# Altium footprint library Grant_..PcbLib: 97 footprints (part 2 of 7)
Each footprint in its own frame and in the unit in brackets; x right, y up, seen from the top. Pads: shape width x height; smd on the part's side, far side on the other; paste and mask are expansions set on the pad; w line width, h text height; cw(c..) or ccw(c..) is an arc to the next point about the centre after c.
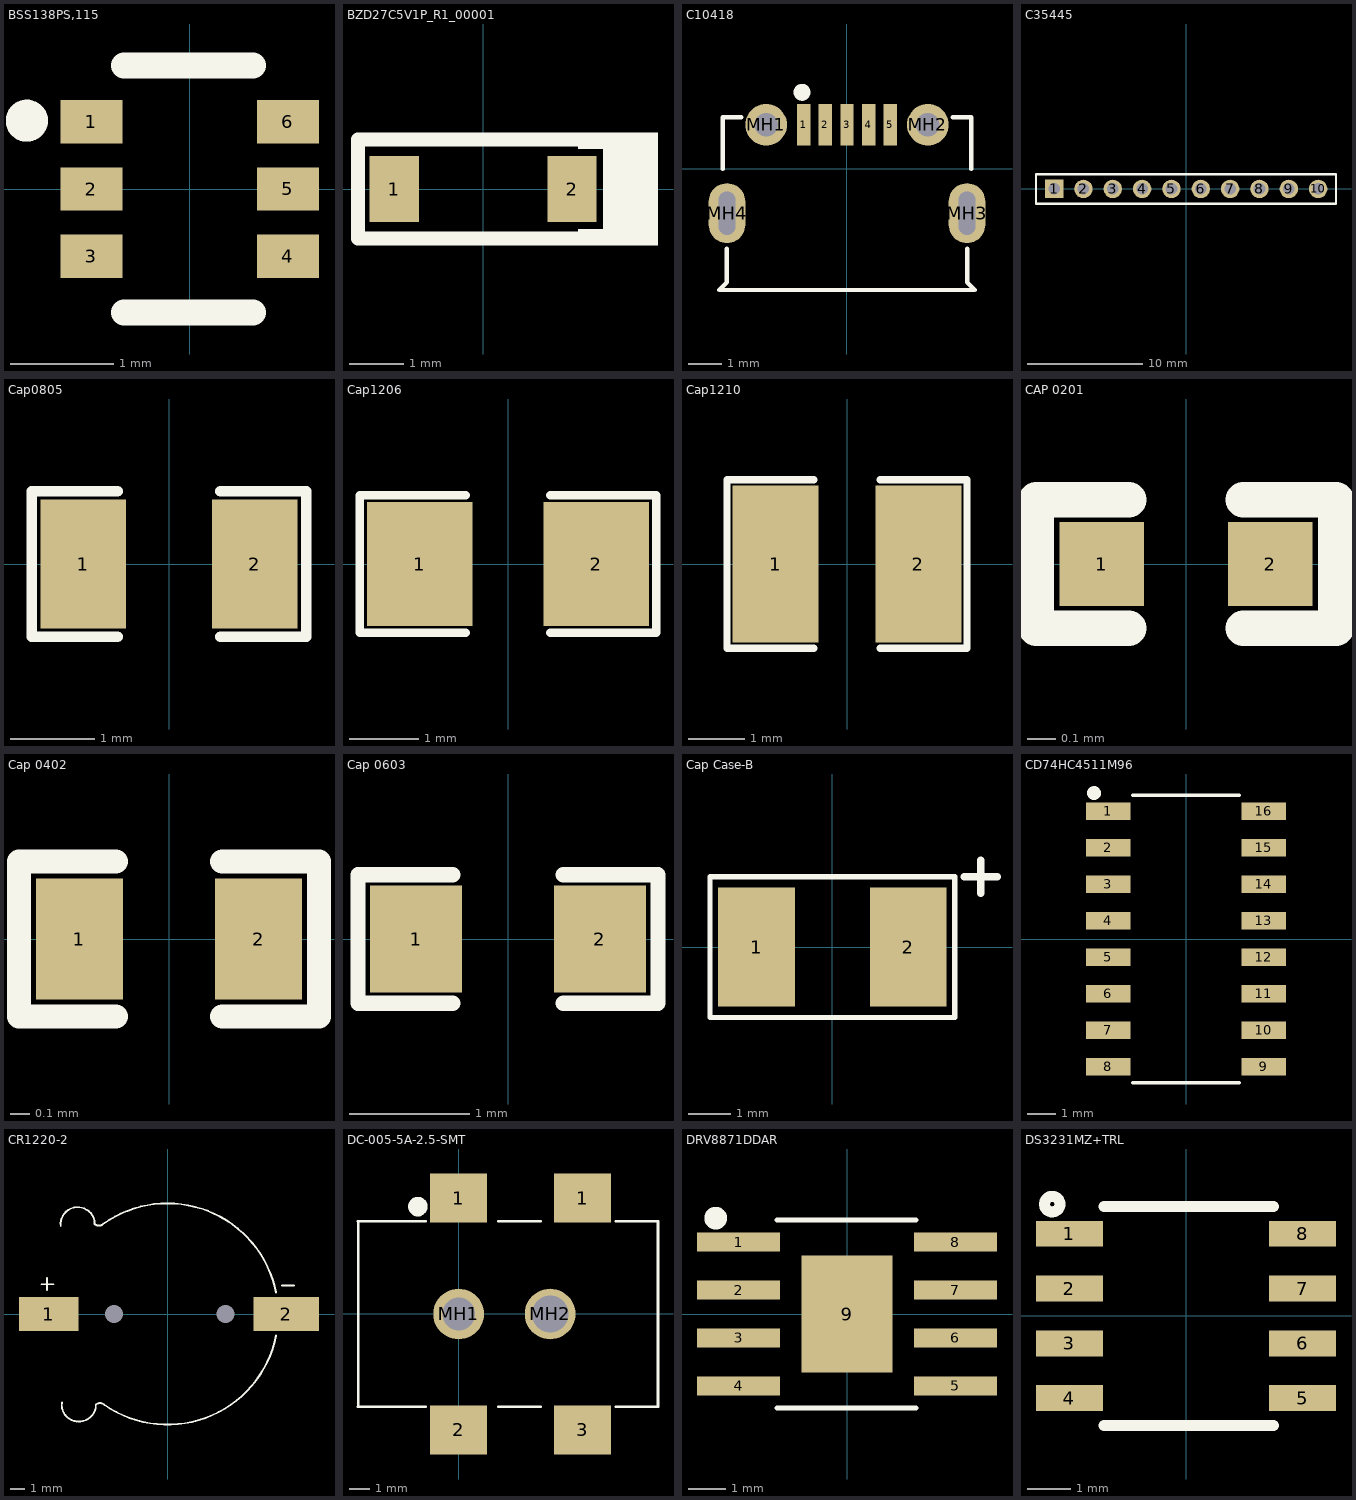
[diagram p1: the footprints below, top view; thin cyan lines are the x and y axes]

## BSS138PS,115 [mm]
pads (6):
  rect 0.6x0.42 smd: 1(-0.95,0.65) 2(-0.95,0) 3(-0.95,-0.65) 4(0.95,-0.65) 5(0.95,0) 6(0.95,0.65)
Top Overlay:
  circle w0.254: c-1.575,0.66 r0.076
  lines w0.254: -0.635,-1.194 0.61,-1.194 ; -0.635,1.194 0.61,1.194
3D body "User Library-SOT363-2.step": height 1.09, standoff -0.01, extent -1.2,-1.1 1.2,1.1

## BZD27C5V1P_R1_00001 [mm]
pads (2):
  rect 0.91x1.22 smd: 1(-1.64,0) 2(1.64,0)
Top Overlay:
  region: 3.226,1.041 2.21,1.041 2.21,-1.041 3.226,-1.041
  region: 2.286,1.041 1.753,1.041 1.753,0.737 2.286,0.737
  region: 2.286,-0.737 1.753,-0.737 1.753,-1.041 2.286,-1.041
  lines w0.254: 2.032,0.914 -2.311,0.914 -2.311,-0.914 -1.448,-0.914 2.057,-0.914
3D body "User Library-SOD-123FL.step": height 0.95, standoff 0.01, extent -1.794,-0.825 1.793,0.825

## C10418 [mm] "USB - Micro B Female USB 2 5 SMD USB Connectors RoHS"
pads (9):
  rect 0.4x1.25 smd: 1(-1.3,1.325) 2(-0.65,1.325) 3(0,1.325) 4(0.65,1.325) 5(1.3,1.325)
  round 1.25 hole 0.7: MH1(-2.425,1.325) MH2(2.425,1.325)
  oval 1.1x1.8 hole 0.5 slot 1.3 at 90 deg: MH3(3.6,-1.325) MH4(-3.6,-1.325)
Top Overlay:
  circle w0.254: c-1.35,2.3 r0.127
  lines w0.127: -3.725,0 -3.725,1.55 -3.175,1.55 ; -3.605,-2.39 -3.605,-3.39 -3.605,-3.4 -3.834,-3.629 3.825,-3.629 ; 3.605,-3.4 3.834,-3.629 ; 3.605,-3.39 3.605,-2.39 ; 3.725,0 3.725,1.55 ; 3.725,1.55 3.175,1.55 3.725,1.55
3D body "10118194c.stp": height 2.72, standoff -0.55, extent -4.025,-4.08 4.025,1.5

## C35445 [mm]
pads (10):
  rect 1.6x1.6 hole 1: 1(-11.43,0)
  round 1.6 hole 1: 2(-8.89,0) 3(-6.35,0) 4(-3.81,0) 5(-1.27,0) 6(1.27,0) 7(3.81,0) 8(6.35,0) 9(8.89,0) 10(11.43,0)
Top Overlay:
  lines w0.2: 12.975,-1.275 -13,-1.27 -13,1.27 -10.795,1.27 12.975,1.27 12.975,-1.27
3D body ".step": height 8.6, standoff -2.9, extent -12.95,-1.27 12.95,1.27

## Cap0805 [mil] "SMD 0805"
pads (2):
  rect 40x60 smd mask+2.76: 1(-40,0) 2(40,0)
Top Overlay:
  lines w5: -24,-34 -64,-34 -64,34 -24,34 ; 24,-34 64,-34 64,34 24,34
3D body "User Library-0805 SMD Capacitor.step": height 30, standoff -0.79, extent -39.36,-24.6 39.38,24.61

## Cap1206 [mil] "SMD 1206"
pads (2):
  rect 60x70 smd: 1(-50,0) 2(50,0)
Top Overlay:
  lines w5: -24,-39 -84,-39 -84,39 -24,39 ; 24,-39 84,-39 84,39 24,39
3D body "User Library-1206 SMD Capacitor.step": height 39.45, standoff 0, extent -62.96,-31.46 63.03,31.53

## Cap1210 [mil] "SMD 1210"
pads (2):
  rect 60x110 smd: 1(-50,0) 2(50,0)
Top Overlay:
  lines w5: -23,-59 -84,-59 -84,59 -23,59 ; 23,-59 84,-59 84,59 23,59
3D body "User Library-CAPC3225X10.step": height 39.37, standoff 0, extent -62.99,-49.21 63,49.22

## CAP 0201 [mm]
pads (2):
  rect 0.3x0.3 smd mask+0.055: 1(-0.3,0) 2(0.3,0)
Top Overlay:
  lines w0.127: -0.203,-0.229 -0.533,-0.229 -0.533,0.229 -0.203,0.229 ; 0.203,-0.229 0.533,-0.229 0.533,0.229 0.203,0.229
3D body "User Library-SMD Ceramic Capacitors_0201 (0603)_AB.STEP": height 0.28, standoff -0.02, extent -0.3,-0.15 0.301,0.15

## Cap 0402 [mil]
pads (2):
  rect 18x25 smd mask+2.36: 1(-18.5,0) 2(18.5,0)
Top Overlay:
  lines w5: -11,-16 -31,-16 -31,16 -11,16 ; 11,-16 31,-16 31,16 11,16
3D body "User Library-Capacitor 0402.step": height 18.5, standoff -1.18, extent -19.68,-9.84 19.7,9.85

## Cap 0603 [mil]
pads (2):
  rect 30x35 smd mask+2.36: 1(-30,0) 2(30,0)
Top Overlay:
  lines w5: -18,-21 -49,-21 -49,21 -18,21 ; 18,-21 49,-21 49,21 18,21
3D body "User Library-CAPC1608X09.step": height 34.25, standoff -1.18, extent -31.51,-15.75 31.49,15.74

## Cap Case-B [mil] "Case-B"
pads (2):
  rect 70.87x110 smd: 1(-70,0) 2(70,0)
Top Overlay:
  lines w5: -113,-65 -113,65 113,65 113,-65 -113,-65
  lines w7: 122,65 152,65 ; 137,50 137,80
3D body "User Library-AVX_BCASE.step": height 76.93, standoff -2.99, extent -72.84,-57.68 72.83,57.68

## CD74HC4511M96 [mm]
pads (16):
  rect 1.55x0.6 smd: 1(-2.7,4.445) 2(-2.7,3.175) 3(-2.7,1.905) 4(-2.7,0.635) 5(-2.7,-0.635) 6(-2.7,-1.905) 7(-2.7,-3.175) 8(-2.7,-4.445) 9(2.7,-4.445) 10(2.7,-3.175) 11(2.7,-1.905) 12(2.7,-0.635) 13(2.7,0.635) 14(2.7,1.905) 15(2.7,3.175) 16(2.7,4.445)
Top Overlay:
  circle w0.254: c-3.2,5.08 r0.114
  lines w0.127: -1.854,-5.004 1.854,-5.004 ; -1.854,5.004 1.854,5.004
3D body "CD74HC4511M96.STEP": height 1.75, standoff 0, extent -2.997,-4.953 2.997,4.953

## CR1220-2 [mm]
pads (4):
  rect 4x2.3 smd: 1(-8,0)
  rect 4.4x2.3 smd: 2(8,0)
  round 0 hole 1.22 unplated: MH1(-3.6,0) MH2(3.9,0)
Top Overlay:
  lines w0.127: -8.502,2.007 -7.689,2.007 ; -8.121,1.6 -8.121,2.413 ; -7.188,5.918 cw(c-6.058,6.058) -6.198,7.188 ; -7.113,-5.971 ccw(c-5.983,-6.111) -6.123,-7.241 ; -6.299,7.163 cw(c-6.045,6.028) -4.91,6.282 -4.91,6.068 ccw(c-4.618,6.36) -4.326,6.068 ; -6.224,-7.215 ccw(c-5.97,-6.081) -4.835,-6.335 -4.835,-6.121 cw(c-4.543,-6.413) -4.251,-6.121 ; -4.325,6.066 cw(c0,0) 7.306,1.456 ; -4.25,-6.119 ccw(c0,0) 7.306,-1.456 ; 7.703,1.93 8.516,1.93
3D body "qj_cr1220-2.stp": height 4, standoff -0.5, extent -9.748,-7.45 9.952,7.45

## DC-005-5A-2.5-SMT [mm]
pads (6):
  rect 2.8x2.4 smd: 1(0,5.7) 1(6.1,5.7) 2(0,-5.7) 3(6.1,-5.7)
  round 2.5 hole 1.6 unplated: MH1(0,0)
  round 2.5 hole 1.8 unplated: MH2(4.5,0)
Top Overlay:
  circle w0.5: c-2.007,5.283 r0.231
  lines w0.127: -4.953,-4.557 -1.626,-4.557 ; -4.953,4.557 -1.626,4.557 ; -4.949,-4.557 -4.949,4.557 ; 1.956,-4.557 4.035,-4.557 ; 1.956,4.557 4.035,4.557 ; 7.726,-4.557 9.804,-4.557 9.805,4.557 7.726,4.557
3D body "CUI-PJ-002A-SMT.step": height 11.17, standoff -1.03, extent -4.987,-6.274 9.813,6.326

## DRV8871DDAR [mm]
pads (9):
  rect 2.2x0.5 smd: 1(-2.875,1.905) 2(-2.875,0.635) 3(-2.875,-0.635) 4(-2.875,-1.905) 5(2.875,-1.905) 6(2.875,-0.635) 7(2.875,0.635) 8(2.875,1.905)
  rect 2.4x3.1 smd: 9(0,0)
Top Overlay:
  circle w0.5: c-3.48,2.54 r0.051
  lines w0.127: -1.854,-2.489 1.829,-2.489 ; -1.854,2.489 1.829,2.489
3D body "LMR14050SDDAR--3DModel-STEP-56544.STEP": height 1.68, standoff -0.02, extent -3,-2.462 3,2.438

## DS3231MZ+TRL [mm]
pads (8):
  rect 1.55x0.6 smd: 1(-2.7,1.905) 2(-2.7,0.635) 3(-2.7,-0.635) 4(-2.7,-1.905) 5(2.7,-1.905) 6(2.7,-0.635) 7(2.7,0.635) 8(2.7,1.905)
Top Overlay:
  circle w0.254: c-3.099,2.591 r0.18
  lines w0.254: -1.905,-2.54 2.032,-2.54 ; -1.905,2.54 2.032,2.54
3D body "User Library-SOIC-8-1.STEP": height 1.65, standoff -0.1, extent -2.906,-2.413 3.094,2.487